# Altium schematic symbol library LTC6820IMS#3ZZPBF.SchLib: 1 symbol
Pins are listed as number, name and electrical type; pins without a type are passive.

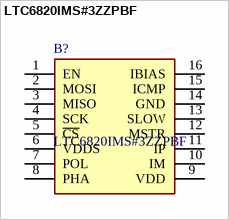
[diagram p0: symbol LTC6820IMS#3ZZPBF]

## LTC6820IMS#3ZZPBF
designator B?
Isolated Communications Interface Interface 16-MSOP; Manufacturer_Name: Analog Devices; Geometry.Height: 1.1mm; Mouser Part Number: 584-6820IMS#3ZZPB; Mouser Price/Stock: https://www.mouser.co.uk/ProductDetail/Analog-Devices/LTC6820IMS3ZZPBF?qs=byeeYqUIh0N8RiK1UGlHvA%3D%3D; Manufacturer_Part_Number: LTC6820IMS#3ZZPBF; Datasheet Link: http://www.linear.com/docs/42317
footprint SOP50P490X110-16N
pins: 1 EN, 2 MOSI, 3 MISO, 4 SCK, 5 ~{CS}, 6 VDDS, 7 POL, 8 PHA, 9 VDD, 10 IM, 11 IP, 12 MSTR, 13 SLOW, 14 GND, 15 ICMP, 16 IBIAS